# Altium schematic symbol library Capacitors.SchLib: 3 symbols
Pins are listed as number, name and electrical type; pins without a type are passive.

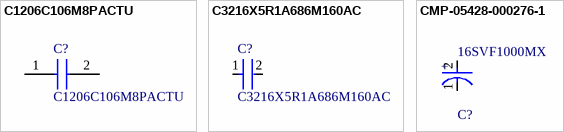
[diagram p0: symbols C1206C106M8PACTU to CMP-05428-000276-1]

## C1206C106M8PACTU
designator C?
Multilayer Ceramic Capacitors MLCC - SMD/SMT 10V 10uF X5R 1206 20%; Manufacturer_Name: Yageo Group; Datasheet Link: https://www.yageogroup.com/content/datasheet/asset/file/KEM_C1006_X5R_SMD; Manufacturer_Part_Number: C1206C106M8PACTU; Mouser Part Number: 80-C1206C106M8P; Mouser Price/Stock: https://www.mouser.co.uk/ProductDetail/KEMET/C1206C106M8PACTU?qs=guDyKOyRtV2o1krdb%252BJI4A%3D%3D; Arrow Part Number: C1206C106M8PACTU; Arrow Price/Stock: https://www.arrow.com/en/products/c1206c106m8pactu/kemet-corporation
footprint C1206
pins: 1, 2

## C3216X5R1A686M160AC
designator C?
10V 68uF X5R ±20% 1206 Multilayer Ceramic Capacitors MLCC - SMD/SMT ROHS; Voltage Rating (DC): 10V; Width: 1.6mm; Voltage Rating: 10V; Case Code (Metric): 3216; Series: C; Case Code (Imperial): 1206; Min Operating Temperature: -55°C; Tolerance: 20%; Thickness: 0.071inch; Case/Package: 1206; Height: 1.6mm; Resistor Type: Ceramic; Mount: Surface Mount; Packaging: Tape and Reel; RoHS Compliant: Yes; Package Quantity: 2000; Lead Free: Lead Free; Dielectric: X5R; Dielectric Material: Ceramic; Termination: SMD/SMT; Length: 0.126inch; Capacitance: 68uF; Max Operating Temperature: 85°C
footprint FP-C3216-160-0_3-MFG
footprint FP-C3216-160-0_3-IPC_C
footprint FP-C3216-160-0_3-IPC_B
footprint FP-C3216-160-0_3-IPC_A
pins: 1, 2

## CMP-05428-000276-1
designator C?, comment 16SVF1000MX
CAP ALUM POLY 1000UF 20% 16V SMD; RoHS Compliant: Yes
footprint FP-OS-CON-SMT-F10-MFG
pins: 1 C, 2 A
text: +